# EAGLE library part AT42QT1011-MAHR (library AT42QT1011-MAHR)
MICROCHIP - AT42QT1011-MAHR - CAPACITIVE TOUCH SENSOR, 1 CH, UDFN-8 Source: Datasheet <http://ww1.microchip.com/downloads/en/DeviceDoc/40001947A.pdf>
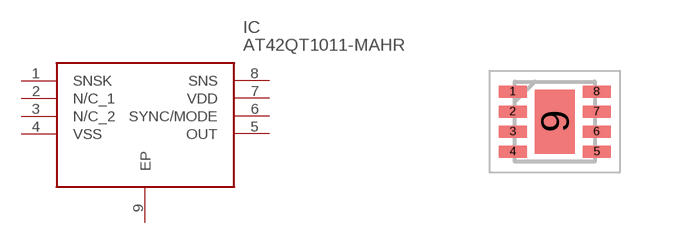
[diagram p0: symbol with the pads of SON50P200X200X60-9N; footprint SON50P200X200X60-9N]

Designator prefix IC

## AT42QT1011-MAHR (Description: MICROCHIP - AT42QT1011-MAHR - CAPACITIVE TOUCH SENSOR, 1 CH, UDFN-8; Height: 0.6mm; Manufacturer_Name: Microchip; Manufacturer_Part_Number: AT42QT1011-MAHR; Mouser_Part_Number: 556-AT42QT1011-MAHR; Mouser_Price-Stock: https://www.mouser.co.uk/ProductDetail/Microchip-Technology/AT42QT1011-MAHR?qs=YCa%2FAAYMW03Z9vaJZZjHhQ%3D%3D)  [SON50P200X200X60-9N]
1  SNSK
2  N/C_1
3  N/C_2
4  VSS
5  OUT
6  SYNC/MODE
7  VDD
8  SNS
9  EP

## Footprint SON50P200X200X60-9N (pad centres in mm)
8-pin UDFN/USON_1
smd 0.7 x 0.3: 1 -1.05,0.75; 2 -1.05,0.25; 3 -1.05,-0.25; 4 -1.05,-0.75; 5 1.05,-0.75; 6 1.05,-0.25; 7 1.05,0.25; 8 1.05,0.75
smd 1 x 1.6: 9 0,0